# Altium schematic symbol library 67996-206HLF.SchLib: 1 symbol
Pins are listed as number, name and electrical type; pins without a type are passive.

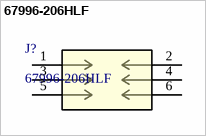
[diagram p0: symbol 67996-206HLF]

## 67996-206HLF
designator J?
Connector Header Through Hole 6 position 0.100" (2.54mm); Manufacturer_Name: Amphenol ICC; Copyright: Copyright (C) 2025 Ultra Librarian. All rights reserved.; Manufacturer_Part_Number: 67996-206HLF; RefDes: RefDes; Type: Type
footprint 67996-206HLF_AMP
pins: 1, 2, 3, 4, 5, 6